# Altium footprint library SOP127P602X175-14N.PcbLib: 1 footprints
Each footprint in its own frame and in the unit in brackets; x right, y up, seen from the top. Pads: shape width x height; smd on the part's side, far side on the other; paste and mask are expansions set on the pad; w line width, h text height; cw(c..) or ccw(c..) is an arc to the next point about the centre after c.
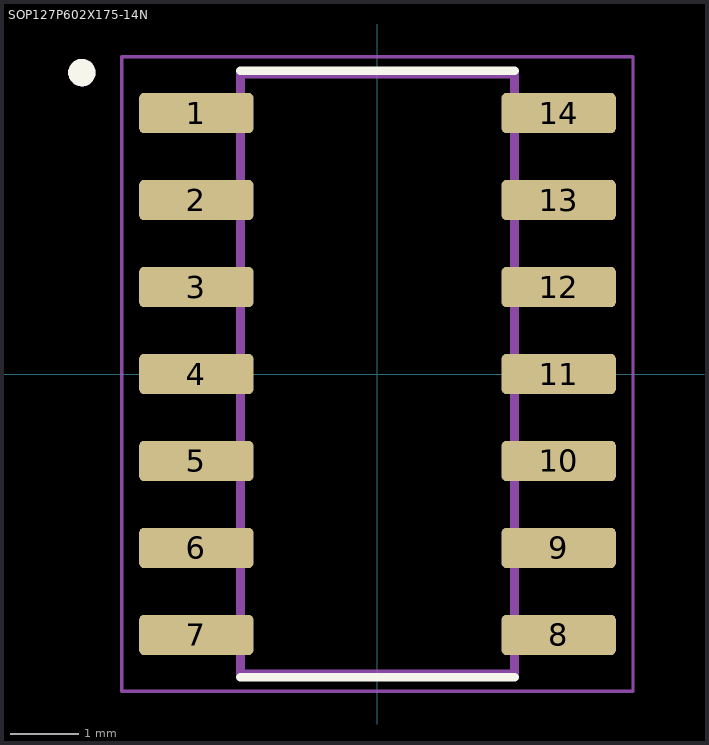
[diagram p0: the footprint, top view; thin cyan lines are the x and y axes]

## SOP127P602X175-14N [mm]
pads (14):
  rrect25% 1.67x0.59 smd: 1(-2.645,3.81) 2(-2.645,2.54) 3(-2.645,1.27) 4(-2.645,0) 5(-2.645,-1.27) 6(-2.645,-2.54) 7(-2.645,-3.81) 8(2.645,-3.81) 9(2.645,-2.54) 10(2.645,-1.27) 11(2.645,0) 12(2.645,1.27) 13(2.645,2.54) 14(2.645,3.81)
Top Overlay:
  circle w0.2: c-4.315,4.4 r0.1
  lines w0.127: -2,-4.425 2,-4.425 ; -2,4.425 2,4.425
Mechanical 13:
  circle w0.2: c-4.315,4.4 r0.1
  lines w0.127: -2,-4.38 2,-4.38 2,4.38 -2,4.38 -2,-4.38
Mechanical 15:
  lines w0.05: -3.73,-4.63 3.73,-4.63 3.73,4.63 -3.73,4.63 -3.73,-4.63